# Altium footprint library Robert_.PcbLib: 95 footprints (part 1 of 6)
Each footprint in its own frame and in the unit in brackets; x right, y up, seen from the top. Pads: shape width x height; smd on the part's side, far side on the other; paste and mask are expansions set on the pad; w line width, h text height; cw(c..) or ccw(c..) is an arc to the next point about the centre after c.
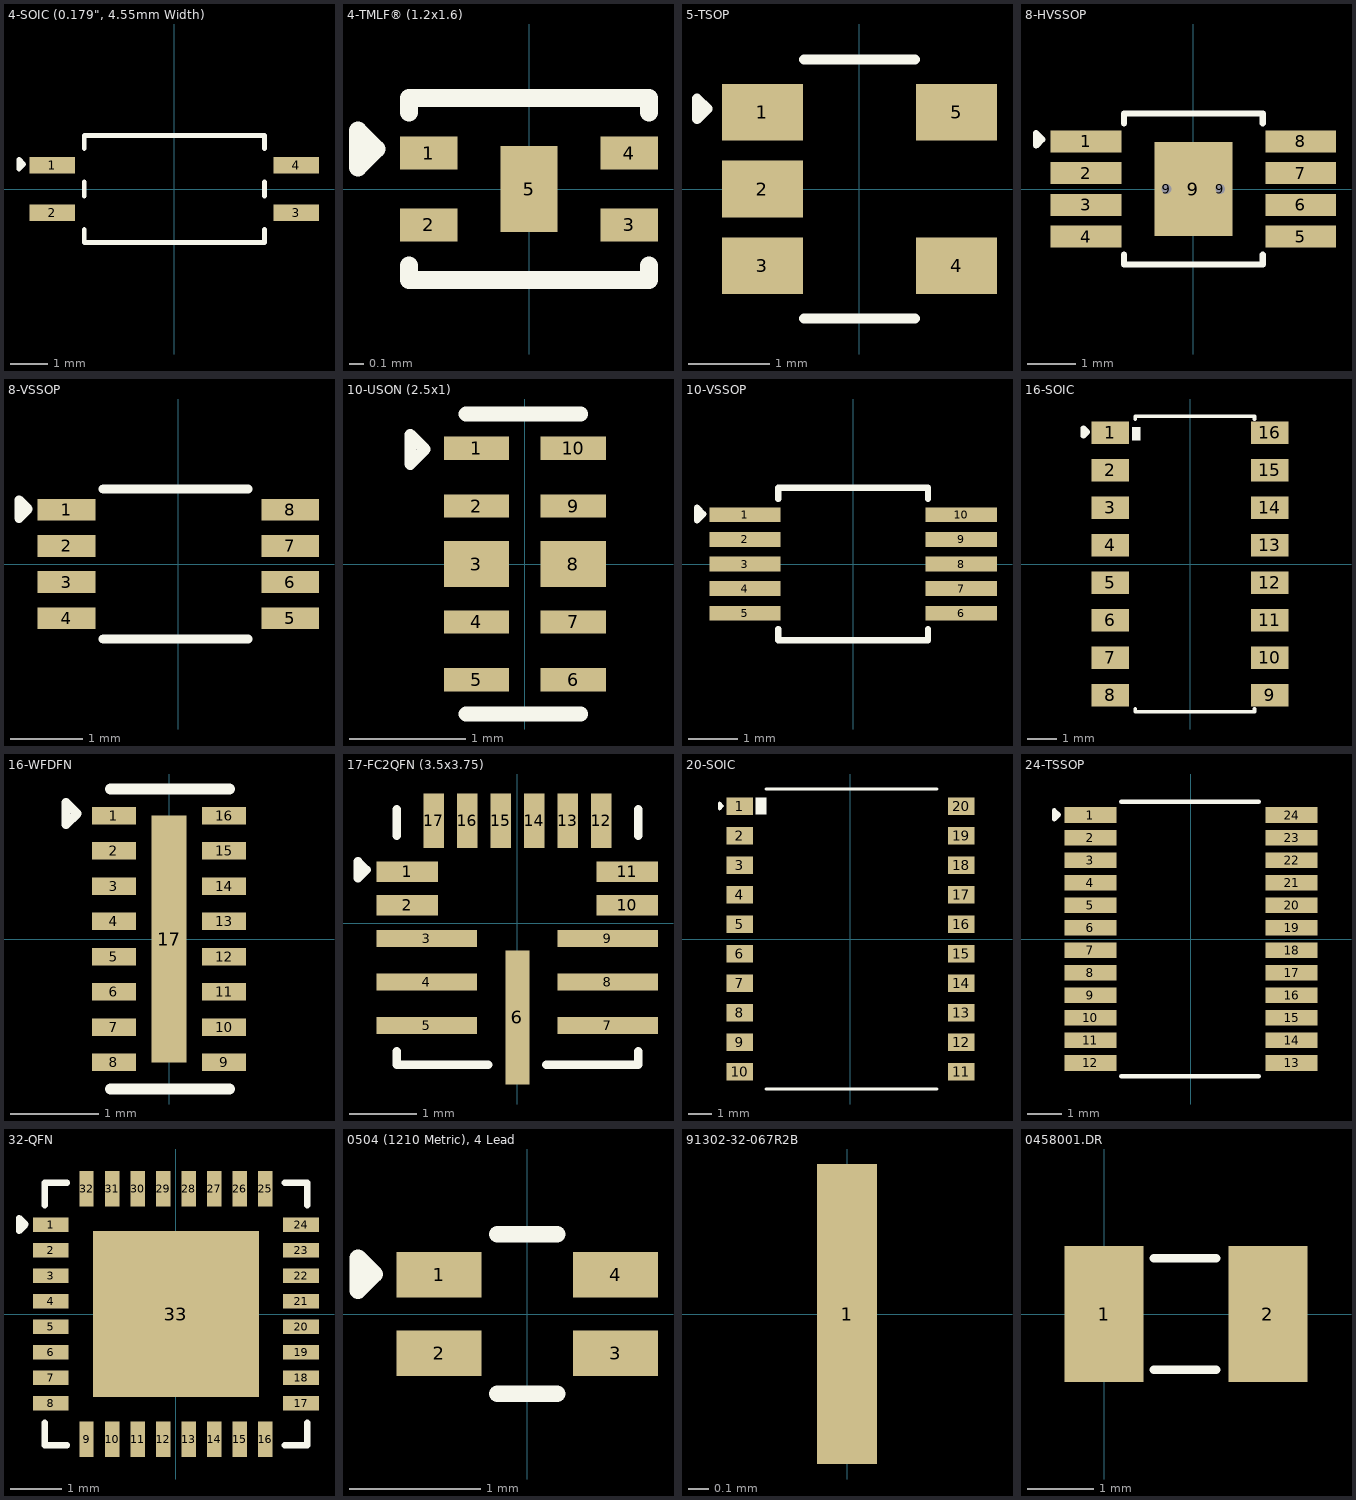
[diagram p0: the footprints below, top view; thin cyan lines are the x and y axes]

## 4-SOIC (0.179", 4.55mm Width) [mm]
pads (4):
  rect 1.211x0.431 smd: 1(-3.25,0.635) 2(-3.25,-0.635) 3(3.25,-0.635) 4(3.25,0.635)
Top Overlay:
  lines w0.127: -2.402,-1.078 -2.402,-1.427 2.402,-1.427 2.402,-1.078 ; -2.402,-0.192 -2.402,0.192 ; -2.402,1.078 -2.402,1.427 2.402,1.427 2.402,1.078 ; 2.402,-0.192 2.402,0.192 ; -4.14,0.533 -4.14,0.787 -4.013,0.66 -4.14,0.533
3D body "SO4_TOS.step": height 2.6, standoff 0, extent -3.5,-1.3 3.5,1.3

## 4-TMLF® (1.2x1.6) [mm]
pads (5):
  rect 0.4x0.23 smd: 1(-0.7,0.25) 2(-0.7,-0.25) 3(0.7,-0.25) 4(0.7,0.25)
  rect 0.4x0.6 smd: 5(0,0)
Top Overlay:
  lines w0.127: -0.838,-0.533 -0.838,-0.635 0.838,-0.635 ; -0.838,0.533 -0.838,0.635 0.838,0.635 ; 0.838,-0.633 0.838,-0.533 ; 0.838,0.533 0.838,0.633 ; -1.194,0.152 -1.067,0.279 -1.194,0.406 -1.194,0.152
Mechanical 3:
  lines w0.127: -0.787,-0.635 0.787,-0.635 ; -0.787,0.635 0.787,0.635
3D body "TMLF-4_MCL.step": height 0.61, standoff 0, extent -0.8,-0.597 0.8,0.597

## 5-TSOP [mm]
pads (5):
  rect 1x0.7 smd: 1(-1.2,0.95) 2(-1.2,0) 3(-1.2,-0.95) 4(1.2,-0.95) 5(1.2,0.95)
Top Overlay:
  lines w0.127: -0.686,-1.6 0.686,-1.6 ; -0.686,1.6 0.686,1.6 ; -2.007,0.864 -2.007,1.118 -1.88,0.991 -2.007,0.864
3D body "User Library-5-TSOP.SLDPRT": height 1.1, standoff 0, extent -1.5,-1.55 1.5,1.55

## 8-HVSSOP [mm]
pads (11):
  rect 1.45x0.45 smd: 1(-2.2,0.975) 2(-2.2,0.325) 3(-2.2,-0.325) 4(-2.2,-0.975) 5(2.2,-0.975) 6(2.2,-0.325) 7(2.2,0.325) 8(2.2,0.975)
  round 0.35 hole 0.2: 9(-0.55,0) 9(0.55,0)
  rect 1.6x1.92 smd: 9(0,0)
Top Overlay:
  lines w0.127: -1.422,-1.346 -1.422,-1.549 1.422,-1.549 1.422,-1.346 ; -1.422,1.346 -1.422,1.549 1.422,1.549 1.422,1.346 ; -3.226,0.889 -3.226,1.143 -3.099,1.016 -3.226,0.889
3D body "LM2623AMM_NOPB.STEP": height 1.1, standoff 0, extent -2.45,-1.5 2.45,1.5

## 8-VSSOP [mm]
pads (8):
  rect 0.8x0.3 smd: 1(-1.55,0.75) 2(-1.55,0.25) 3(-1.55,-0.25) 4(-1.55,-0.75) 5(1.55,-0.75) 6(1.55,-0.25) 7(1.55,0.25) 8(1.55,0.75)
Top Overlay:
  lines w0.127: -1.041,-1.041 0.965,-1.041 ; -1.041,1.041 0.965,1.041 ; -2.21,0.635 -2.083,0.762 -2.21,0.889 -2.21,0.635
3D body "TXB0102DCUT.STEP": height 0.9, standoff 0, extent -1.55,-1 1.55,1

## 10-USON (2.5x1) [mm]
pads (10):
  rect 0.565x0.2 smd: 1(-0.417,1) 2(-0.417,0.5) 4(-0.417,-0.5) 5(-0.417,-1) 6(0.417,-1) 7(0.417,-0.5) 9(0.417,0.5) 10(0.417,1)
  rect 0.565x0.4 smd: 3(-0.417,0) 8(0.417,0)
Top Overlay:
  lines w0.1: -0.991,0.864 -0.991,1.118 -0.864,0.991 -0.991,0.864
  lines w0.127: -0.508,-1.295 0.483,-1.295 ; -0.508,1.295 0.483,1.295
3D body "TPD4E02B04QDQARQ1.STEP": height 0.55, standoff 0, extent -0.5,-1.25 0.5,1.25

## 10-VSSOP [mm]
pads (10):
  rect 1.45x0.3 smd: 1(-2.2,1) 2(-2.2,0.5) 3(-2.2,0) 4(-2.2,-0.5) 5(-2.2,-1) 6(2.2,-1) 7(2.2,-0.5) 8(2.2,0) 9(2.2,0.5) 10(2.2,1)
Top Overlay:
  lines w0.127: -1.524,-1.321 -1.524,-1.549 1.524,-1.549 1.524,-1.321 ; -1.524,1.321 -1.524,1.549 1.524,1.549 1.524,1.321 ; -3.175,0.889 -3.175,1.143 -3.048,1.016 -3.175,0.889
3D body "ads1115idgsr.stp": height 1.09, standoff -0.01, extent -2.563,-1.499 2.512,1.501

## 16-SOIC [mm]
pads (16):
  rect 1.27x0.76 smd: 1(-2.7,4.445) 2(-2.7,3.175) 3(-2.7,1.905) 4(-2.7,0.635) 5(-2.7,-0.635) 6(-2.7,-1.905) 7(-2.7,-3.175) 8(-2.7,-4.445) 9(2.7,-4.445) 10(2.7,-3.175) 11(2.7,-1.905) 12(2.7,-0.635) 13(2.7,0.635) 14(2.7,1.905) 15(2.7,3.175) 16(2.7,4.445)
Top Overlay:
  rectangle: -1.963,4.191 -1.684,4.648
  lines w0.127: -1.862,-4.902 -1.862,-5.004 2.177,-5.004 ; -1.862,4.902 -1.862,5.004 2.177,5.004 ; 2.182,-5.002 2.182,-4.902 ; 2.182,4.902 2.182,5.002
  lines w0.2: -3.614,4.343 -3.614,4.597 -3.487,4.47 -3.614,4.343
3D body "MAX14850ASE+.STEP": height 1.75, standoff 0, extent -3,-4.95 3,4.95

## 16-WFDFN [mm]
pads (17):
  rect 0.5x0.2 smd: 1(-0.625,1.4) 2(-0.625,1) 3(-0.625,0.6) 4(-0.625,0.2) 5(-0.625,-0.2) 6(-0.625,-0.6) 7(-0.625,-1) 8(-0.625,-1.4) 9(0.625,-1.4) 10(0.625,-1) 11(0.625,-0.6) 12(0.625,-0.2) 13(0.625,0.2) 14(0.625,0.6) 15(0.625,1) 16(0.625,1.4)
  rect 0.4x2.8 smd: 17(0,0)
Top Overlay:
  lines w0.1: -1.168,1.295 -1.041,1.422 -1.168,1.549 -1.168,1.295
  lines w0.127: -0.66,-1.702 0.686,-1.702 ; -0.66,1.702 0.686,1.702
3D body "DQD0016A.stp": height 0.8, standoff 0, extent -0.675,-1.65 0.675,1.65

## 17-FC2QFN (3.5x3.75) [mil]
pads (17):
  rect 36x12 smd: 1(-64.62,30.39) 2(-64.62,10.7) 10(64.62,10.7) 11(64.62,30.39)
  rect 59x10 smd: 3(-53.12,-8.98) 4(-53.12,-34.57) 5(-53.12,-60.17) 7(53.12,-60.17) 8(53.12,-34.57) 9(53.12,-8.98)
  rect 14x78.74 smd: 6(0,-55.24)
  rect 12x32 smd: 12(49.21,60.17) 13(29.53,60.17) 14(9.84,60.17) 15(-9.84,60.17) 16(-29.53,60.17) 17(-49.21,60.17)
Top Overlay:
  lines w5: -71,-75.27 -71,-83.02 -17.1,-83.02 ; -71,51.45 -71,67 ; 17.1,-83.02 71,-83.02 71,-75.27 ; 71,51.45 71,67 ; -93.62,26.39 -93.62,36.39 -88.62,31.39 -93.62,26.39
3D body "MAXIM_21-100155.step": height 29.53, standoff 0, extent -68.9,-80.82 68.9,66.82

## 20-SOIC [mil]
pads (20):
  rect 45x30 smd: 1(-187.5,225) 2(-187.5,175) 3(-187.5,125) 4(-187.5,75) 5(-187.5,25) 6(-187.5,-25) 7(-187.5,-75) 8(-187.5,-125) 9(-187.5,-175) 10(-187.5,-225) 11(187.5,-225) 12(187.5,-175) 13(187.5,-125) 14(187.5,-75) 15(187.5,-25) 16(187.5,25) 17(187.5,75) 18(187.5,125) 19(187.5,175) 20(187.5,225)
Top Overlay:
  rectangle: -161,211 -142,240
  lines w5: -143,-254 147,-254 ; -143,254 147,254 ; -221.33,220.25 -216.33,225.25 -221.33,230.25 -221.33,220.25
3D body "ADM3057EBRWZ.step": height 104.33, standoff 0, extent -203.25,-251.97 203.25,251.97

## 24-TSSOP [mm]
pads (24):
  rect 1.5x0.45 smd: 1(-2.9,3.575) 2(-2.9,2.925) 3(-2.9,2.275) 4(-2.9,1.625) 5(-2.9,0.975) 6(-2.9,0.325) 7(-2.9,-0.325) 8(-2.9,-0.975) 9(-2.9,-1.625) 10(-2.9,-2.275) 11(-2.9,-2.925) 12(-2.9,-3.575) 13(2.9,-3.575) 14(2.9,-2.925) 15(2.9,-2.275) 16(2.9,-1.625) 17(2.9,-0.975) 18(2.9,-0.325) 19(2.9,0.325) 20(2.9,0.975) 21(2.9,1.625) 22(2.9,2.275) 23(2.9,2.925) 24(2.9,3.575)
Top Overlay:
  lines w0.127: -2.007,-3.962 1.956,-3.962 ; -2.007,3.962 1.956,3.962 ; -3.937,3.454 -3.81,3.581 -3.937,3.708 -3.937,3.454
3D body "SN74LVC8T245MPWREP.STEP": height 1.2, standoff 0, extent -3.2,-3.9 3.2,3.9

## 32-QFN [mm] "32pins, 5x5mm body, 0.5mm pitch QFN package"
pads (33):
  rect 0.7x0.28 smd: 1(-2.45,1.75) 2(-2.45,1.25) 3(-2.45,0.75) 4(-2.45,0.25) 5(-2.45,-0.25) 6(-2.45,-0.75) 7(-2.45,-1.25) 8(-2.45,-1.75) 17(2.45,-1.75) 18(2.45,-1.25) 19(2.45,-0.75) 20(2.45,-0.25) 21(2.45,0.25) 22(2.45,0.75) 23(2.45,1.25) 24(2.45,1.75)
  rect 0.28x0.7 smd: 9(-1.75,-2.45) 10(-1.25,-2.45) 11(-0.75,-2.45) 12(-0.25,-2.45) 13(0.25,-2.45) 14(0.75,-2.45) 15(1.25,-2.45) 16(1.75,-2.45) 25(1.75,2.45) 26(1.25,2.45) 27(0.75,2.45) 28(0.25,2.45) 29(-0.25,2.45) 30(-0.75,2.45) 31(-1.25,2.45) 32(-1.75,2.45)
  rect 3.254x3.254 smd: 33(0,0)
Top Overlay:
  lines w0.127: -2.565,-2.134 -2.565,-2.565 -2.134,-2.565 ; -2.565,2.134 -2.565,2.565 -2.134,2.565 ; 2.134,-2.565 2.565,-2.565 2.565,-2.134 ; 2.134,2.565 2.565,2.565 2.565,2.134 ; -3.073,1.626 -2.946,1.753 -3.073,1.88 -3.073,1.626
3D body "User Library-QFN-32-5x5 - EQ.STEP": height 0.85, standoff 0, extent -2.5,-2.5 2.5,2.5

## 0504 (1210 Metric), 4 Lead [mm]
pads (4):
  rect 0.65x0.35 smd: 1(-0.675,0.3) 2(-0.675,-0.3) 3(0.675,-0.3) 4(0.675,0.3)
Top Overlay:
  lines w0.127: -0.229,-0.61 0.229,-0.61 ; -0.229,0.61 0.229,0.61 ; -1.295,0.178 -1.168,0.305 -1.295,0.432 -1.295,0.178
3D body "XMER_EXC2_PAN.step": height 0.61, standoff 0, extent -0.699,-0.572 0.699,0.572

## 91302-32-067R2B [mm]
pads (1):
  rect 0.3x1.5 smd: 1(0,0)

## 0458001.DR [mm]
pads (2):
  rect 1.185x2.05 smd: 1(0,0) 2(2.465,0)
Top Overlay:
  lines w0.127: 0.75,-0.838 1.69,-0.838 ; 0.75,0.838 1.69,0.838
3D body "0458Series_LTF.step": height 1.58, standoff 0, extent -0.356,-0.787 2.82,0.787